# Altium schematic symbol library Centralize.SchLib: 1081 symbols (part 19 of 26)
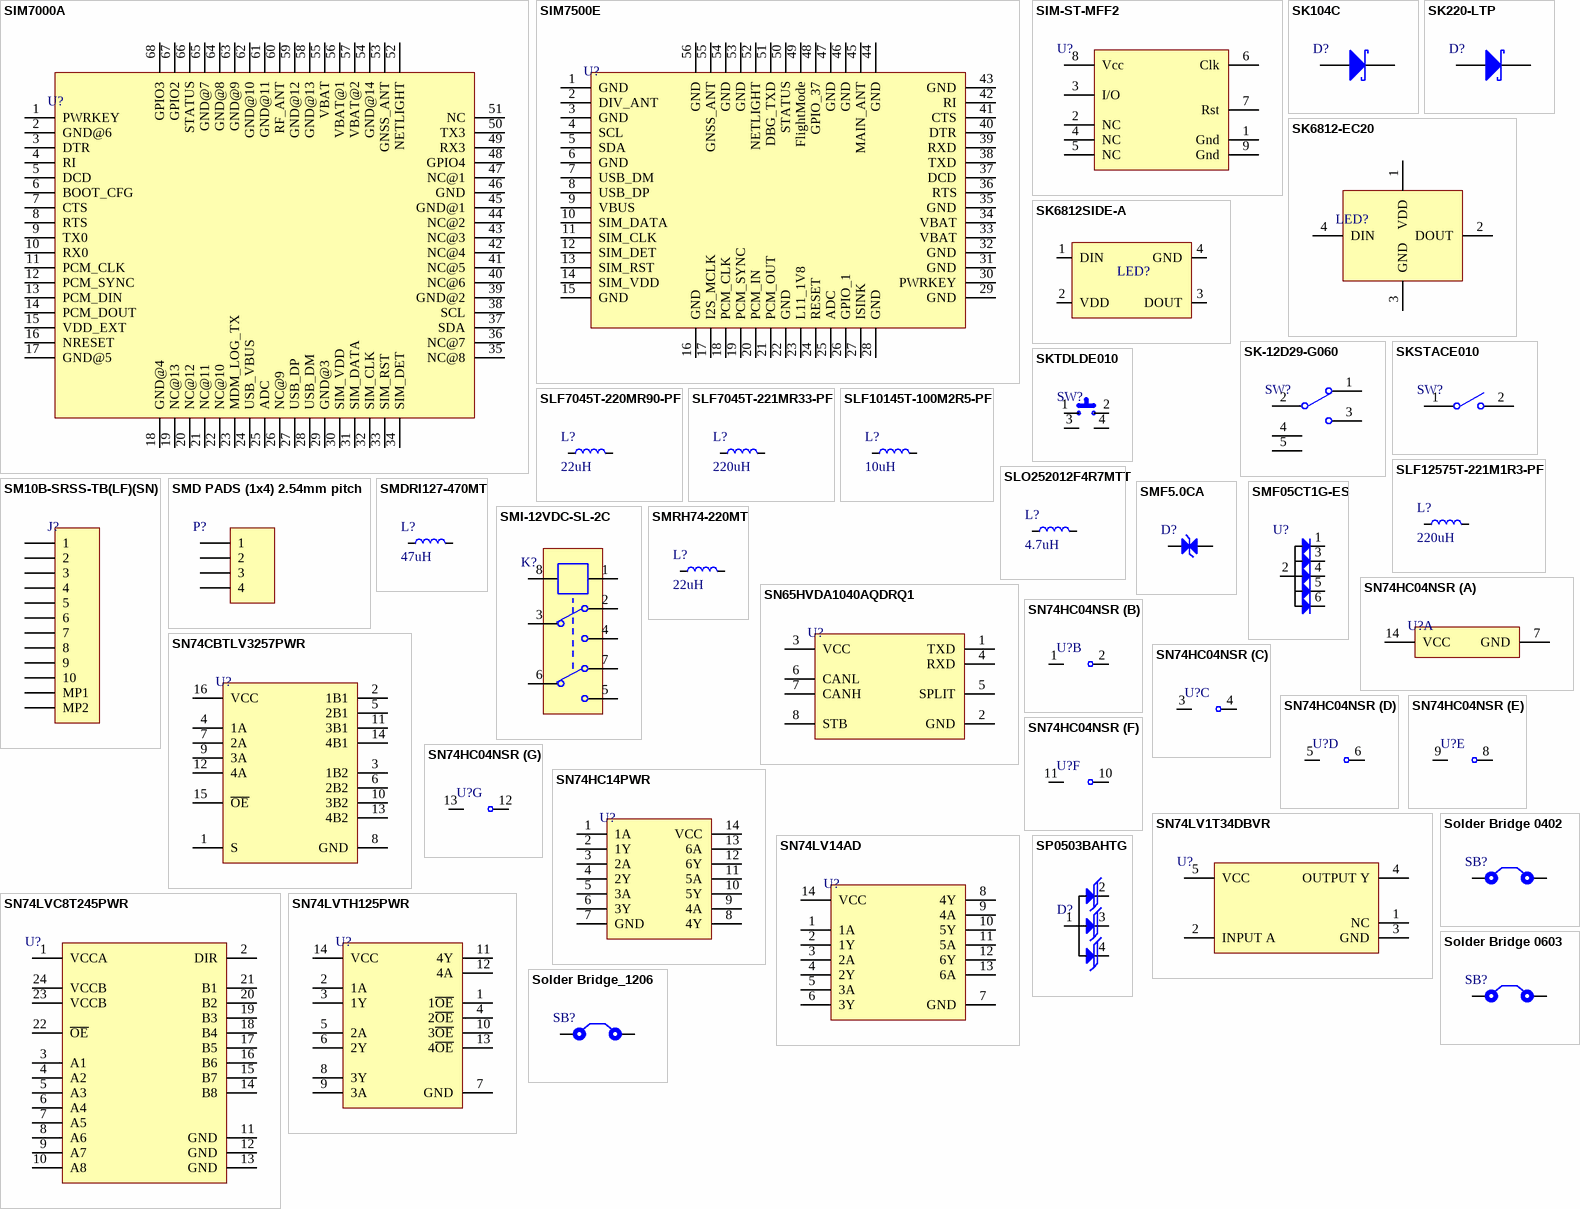
[diagram p65: symbols SIM7000A to SP0503BAHTG]

## SN74CBTLV3257PWR
designator U?
IC MUX/DEMUX 4 X 1:2 16TSSOP; Manufacturer: Texas Instruments; Manufacturer Part Number: SN74CBTLV3257PWR; Propagation Delay: 0.25ns; Number of Bits: 8; Polarity: Non-Inverting; Throw Configuration: SPDT; Number of Channels: 4; Min Supply Voltage: 2.3V; Max Supply Voltage: 3.6V; Bandwidth: 200MHz; Logic Function: Multiplexer,Demultiplexer; Number of Elements: 1; High Level Output Current: -128mA; Low Level Output Current: 128mA; Turn-On Delay Time: 6.1ns; Quiescent Current: 10uA; Supply Type: Single; Supplier 1: Mouser; RoHS: Yes; Category: Decoders and Multiplexers; Stock 1: 66357; Pricing 1: 1=0.72, 10=0.63, 50=0.63, 100=0.483, 1000=0.306, 10000=0.251 (USD); Mounting Technology: Surface Mount; Case/Package: TSSOP; Pins: 16; Weight: 0.002081oz; Min Operating Temperature: -40°C; Max Operating Temperature: 85°C; Packaging: Tape and Reel; Package Quantity: 2000; Number of Inputs: 8; Number of Outputs: 4; Independent Circuits: 4; Series: 74CBTLV; Technology: CMOS; Operating Supply Current: 10uA; Number of Switches: 1; Length: 5mm; Width: 4.4mm; Height: 1.15mm; Radiation Hardening: No; Lead Free: Lead Free; Reach SVHC Compliant: No; RoHS Compliant: Yes; ComponentLink1URL: https://datasheet.ciiva.com/34301/914507-34301751.pdf?src-supplier=Jameco; ComponentLink1Description: https://datasheet.ciiva.com/34301/914507-34301751.pdf?src-supplier=Jameco; ComponentLink2URL: https://datasheet.ciiva.com/15096/getdatasheetpartid-475832-15096886.pdf?src-supplier=Verical; ComponentLink2Description: https://datasheet.ciiva.com/15096/getdatasheetpartid-475832-15096886.pdf?src-supplier=Verical; ComponentLink3URL: https://datasheet.ciiva.com/41457/001016561-da-01-en-ic-4b-1of-sn74cbtlv3257pwr-tssop-16-tid-41457145.pdf?src-supplier=Conrad; ComponentLink3Description: https://datasheet.ciiva.com/41457/001016561-da-01-en-ic-4b-1of-sn74cbtlv3257pwr-tssop-16-tid-41457145.pdf?src-supplier=Conrad; ComponentLink4URL: https://datasheet.ciiva.com/1509/1634002-1509116.pdf?src-supplier=Element14; ComponentLink4Description: https://datasheet.ciiva.com/1509/1634002-1509116.pdf?src-supplier=Element14; ComponentLink5URL: https://datasheet.ciiva.com/46395/1882419-46395595.pdf?src-supplier=Element14; ComponentLink5Description: https://datasheet.ciiva.com/46395/1882419-46395595.pdf?src-supplier=Element14; ComponentLink6URL: https://datasheet.ciiva.com/1888/sn74cbtlv3257-1888772.pdf?src-supplier=Digi-Key; ComponentLink6Description: https://datasheet.ciiva.com/1888/sn74cbtlv3257-1888772.pdf?src-supplier=Digi-Key; ComponentLink7URL: https://datasheet.ciiva.com/1888/sn74cbtlv3257-1888771.pdf?src-supplier=Digi-Key; ComponentLink7Description: https://datasheet.ciiva.com/1888/sn74cbtlv3257-1888771.pdf?src-supplier=Digi-Key; ComponentLink8URL: https://datasheet.ciiva.com/1888/sn74cbtlv3257-1888773.pdf?src-supplier=Digi-Key; ComponentLink8Description: https://datasheet.ciiva.com/1888/sn74cbtlv3257-1888773.pdf?src-supplier=Digi-Key; ComponentLink9URL: https://datasheet.ciiva.com/3169/sn74cbtlv3257-3169116.pdf?src-supplier=Avnet; ComponentLink9Description: https://datasheet.ciiva.com/3169/sn74cbtlv3257-3169116.pdf?src-supplier=Avnet; ComponentLink10URL: https://datasheet.ciiva.com/3169/sn74cbtlv3257-3169117.pdf?src-supplier=Avnet; ComponentLink10Description: https://datasheet.ciiva.com/3169/sn74cbtlv3257-3169117.pdf?src-supplier=Avnet; Supplier Part Number 1: 595-SN74CBTLV3257PWR; LCSC Part Number: C7637; Item Type: IC
footprint 16-TSSOP (0.173", 4.40mm Width)
pins: 1 S, 2 1B1, 3 1B2, 4 1A, 5 2B1, 6 2B2, 7 2A, 8 GND, 9 3A, 10 3B2, 11 3B1, 12 4A, 13 4B2, 14 4B1, 15 ~{OE}, 16 VCC

## SN74HC04NSR
designator U?
6 16ns@6V,50pF 2uA 2V~6V SOIC-14-208mil Inverters ROHS; Manufacturer: Texas Instruments; Manufacturer Part Number: SN74HC04NSR; Max Supply Voltage: 6V; Min Supply Voltage: 2V; Number of Inputs: 1; Propagation Delay: 120ns; Logic Function: Buffer,Inverter; Number of Elements: 6; High Level Output Current: -5.2mA; Low Level Output Current: 5.2mA; Turn-On Delay Time: 20ns; Operating Supply Voltage: 5V; Item Type: IC; Supplier 1: Digi-Key; RoHS: Yes; Category: Logic Gates; Stock 1: 1936; Pricing 1: 1=0.74, 10=0.65, 25=0.6108, 100=0.4984, 250=0.46296, 500=0.394, 1000=0.3152 (USD); Mounting Technology: Surface Mount; Case/Package: SOP; Pins: 14; Weight: 0.007348oz; Min Operating Temperature: -40°C; Max Operating Temperature: 85°C; Packaging: Tape and Reel; Package Quantity: 1; Number of Circuits: 6; Quiescent Current: 2uA; Number of Gates: 6; Number of Bits: 6; Series: 74HC; Technology: CMOS; Radiation Hardening: No; Lead Free: Lead Free; RoHS Compliant: Yes; Reach SVHC Compliant: No; ComponentLink1URL: https://datasheet.ciiva.com/15089/getdatasheetpartid-409522-15089683.pdf?src-supplier=Verical; ComponentLink1Description: https://datasheet.ciiva.com/15089/getdatasheetpartid-409522-15089683.pdf?src-supplier=Verical; ComponentLink2URL: https://datasheet.ciiva.com/46439/1834038-46439813.pdf?src-supplier=Element14; ComponentLink2Description: https://datasheet.ciiva.com/46439/1834038-46439813.pdf?src-supplier=Element14; ComponentLink3URL: https://datasheet.ciiva.com/1864/sn74hc04-1864851.pdf?src-supplier=Digi-Key; ComponentLink3Description: https://datasheet.ciiva.com/1864/sn74hc04-1864851.pdf?src-supplier=Digi-Key; ComponentLink4URL: https://datasheet.ciiva.com/1864/sn74hc04-1864850.pdf?src-supplier=Digi-Key; ComponentLink4Description: https://datasheet.ciiva.com/1864/sn74hc04-1864850.pdf?src-supplier=Digi-Key; ComponentLink5URL: https://datasheet.ciiva.com/1864/sn74hc04-1864852.pdf?src-supplier=Digi-Key; ComponentLink5Description: https://datasheet.ciiva.com/1864/sn74hc04-1864852.pdf?src-supplier=Digi-Key; ComponentLink6URL: https://datasheet.ciiva.com/14292/sn54hc04-sp-14292233.pdf?src-supplier=Avnet; ComponentLink6Description: https://datasheet.ciiva.com/14292/sn54hc04-sp-14292233.pdf?src-supplier=Avnet; ComponentLink7URL: https://datasheet.ciiva.com/14288/sn54hc04-sp-14288839.pdf?src-supplier=Avnet; ComponentLink7Description: https://datasheet.ciiva.com/14288/sn54hc04-sp-14288839.pdf?src-supplier=Avnet; Supplier Part Number 1: 296-12883-1-ND; LCSC Part Number: C6812
footprint 14-SOIC (208 mil)
part A pins: 7 GND, 14 VCC
part B pins: 1 1A, 2 1Y
part C pins: 3 2A, 4 2Y
part D pins: 5 3A, 6 3Y
part E pins: 8 4Y, 9 4A
part F pins: 10 5Y, 11 5A
part G pins: 12 6Y, 13 6A

## SN74HC14PWR
designator U?
Inverter IC 6 Channel Schmitt Trigger 14-TSSOP; Manufacturer: Texas Instruments; Manufacturer Part Number: SN74HC14PWR; Propagation Delay: 155ns; Operating Supply Voltage: 5V; Max Supply Voltage: 6V; Min Supply Voltage: 2V; Number of Inputs: 6; Logic Function: Inverter,Schmitt Trigger; High Level Output Current: -5.2mA; Low Level Output Current: 5.2mA; Quiescent Current: 2uA; Turn-On Delay Time: 31ns; Supplier 1: Mouser; RoHS: Yes; Category: Logic Gates; Stock 1: 47880; Pricing 1: 1=0.37, 10=0.299, 50=0.299, 100=0.204, 1000=0.115, 10000=0.092 (USD); Mounting Technology: Surface Mount; Case/Package: TSSOP; Pins: 14; Weight: 0.002018oz; Min Operating Temperature: -40°C; Max Operating Temperature: 85°C; Packaging: Tape and Reel; Number of Circuits: 6; Number of Bits: 6; Series: 74HC; Output Current: 5.2mA; Number of Elements: 6; Number of Gates: 6; Input Type: SCHMITT TRIGGER; Technology: CMOS; Radiation Hardening: No; Lead Free: Lead Free; RoHS Compliant: Yes; Reach SVHC Compliant: No; ComponentLink1URL: https://datasheet.ciiva.com/27050/915016-27050919.pdf?src-supplier=Jameco; ComponentLink1Description: https://datasheet.ciiva.com/27050/915016-27050919.pdf?src-supplier=Jameco; ComponentLink2URL: https://datasheet.ciiva.com/15089/getdatasheetpartid-253158-15089479.pdf?src-supplier=Verical; ComponentLink2Description: https://datasheet.ciiva.com/15089/getdatasheetpartid-253158-15089479.pdf?src-supplier=Verical; ComponentLink3URL: https://datasheet.ciiva.com/46439/1836414-46439775.pdf?src-supplier=Element14; ComponentLink3Description: https://datasheet.ciiva.com/46439/1836414-46439775.pdf?src-supplier=Element14; ComponentLink4URL: https://datasheet.ciiva.com/1864/sn74hc14-1864726.pdf?src-supplier=Digi-Key; ComponentLink4Description: https://datasheet.ciiva.com/1864/sn74hc14-1864726.pdf?src-supplier=Digi-Key; ComponentLink5URL: https://datasheet.ciiva.com/1864/sn74hc14-1864725.pdf?src-supplier=Digi-Key; ComponentLink5Description: https://datasheet.ciiva.com/1864/sn74hc14-1864725.pdf?src-supplier=Digi-Key; ComponentLink6URL: https://datasheet.ciiva.com/1864/sn74hc14-1864727.pdf?src-supplier=Digi-Key; ComponentLink6Description: https://datasheet.ciiva.com/1864/sn74hc14-1864727.pdf?src-supplier=Digi-Key; ComponentLink7URL: https://datasheet.ciiva.com/14290/sn54hc14-14290382.pdf?src-supplier=Avnet; ComponentLink7Description: https://datasheet.ciiva.com/14290/sn54hc14-14290382.pdf?src-supplier=Avnet; ComponentLink8URL: https://datasheet.ciiva.com/14290/sn54hc14-14290379.pdf?src-supplier=Avnet; ComponentLink8Description: https://datasheet.ciiva.com/14290/sn54hc14-14290379.pdf?src-supplier=Avnet; Supplier Part Number 1: 595-SN74HC14PWR; LCSC Part Number: C6821; Item Type: IC
footprint 14-TSSOP
pins: 1 1A, 2 1Y, 3 2A, 4 2Y, 5 3A, 6 3Y, 7 GND, 8 4Y, 9 4A, 10 5Y, 11 5A, 12 6Y, 13 6A, 14 VCC

## SN74LV1T34DBVR
designator U?
IC BUF NON-INVERT 5.5V SOT23-5; Manufacturer: Texas Instruments; Manufacturer Part Number: SN74LV1T34DBVR; Number of Elements: 1; Logic Function: Buffer,Inverting; High Level Output Current: -8mA; Low Level Output Current: 8mA; Min Supply Voltage: 1.6V; Polarity: Non-Inverting; Propagation Delay: 15.5ns; Quiescent Current: 1uA; Supplier 1: Digi-Key; Stock 1: 37360; Pricing 1: 1=0.43, 10=0.349, 25=0.3192, 100=0.2374, 250=0.2152, 500=0.17808, 1000=0.13356 (USD); Mount: Surface Mount; Case/Package: SOT-23-5; Number of Pins: 5; Weight: 0.000353oz; Min Operating Temperature: -40°C; Max Operating Temperature: 125°C; Packaging: Tape and Reel; Number of Bits per Element: 1; Number of Bits: 1; Package Quantity: 3000; Max Supply Voltage: 5.5V; Number of Input Lines: 1; Number of Output Lines: 1; Operating Supply Current: 8mA; Number of Channels: 1; Number of Inputs: 1; Number of Outputs: 1; Radiation Hardening: No; RoHS Compliant: Yes; REACH SVHC: No SVHC; Lead Free: Lead Free; ComponentLink1URL: http://www.ti.com/lit/pdf/sdyu001?src-supplier=Digi-Key; ComponentLink1Description: http://www.ti.com/lit/pdf/sdyu001?src-supplier=Digi-Key; ComponentLink2URL: http://www.ti.com/lit/ds/symlink/sn74lv1t34.pdf?src-supplier=Avnet; ComponentLink2Description: http://www.ti.com/lit/ds/symlink/sn74lv1t34.pdf?src-supplier=Avnet; Supplier Part Number 1: 296-37176-6-ND; LCSC Part Number: C100024; Item Type: IC
footprint SOT-23-5
pins: 1 NC, 2 INPUT A, 3 GND, 4 OUTPUT Y, 5 VCC

## SN74LV14AD
designator U?
SOIC-14 Inverters ROHS; Manufacturer: Texas Instruments; Manufacturer Part Number: SN74LV14AD; Logic Function: Buffer,Inverter,Schmitt Trigger; Number of Elements: 6; Output Current: 12mA; Number of Inputs: 1; Min Supply Voltage: 2V; Max Supply Voltage: 5.5V; Propagation Delay: 27ns; Quiescent Current: 20uA; High Level Output Current: -12mA; Turn-On Delay Time: 12ns; Input Type: SCHMITT TRIGGER; Schmitt Trigger Input: Yes; Item Type: IC; Supplier 1: Digi-Key; RoHS: Yes; Category: Logic Gates; Stock 1: 2467; Pricing 1: 1=1.16000, 10=1.04100, 25=0.98840, 100=0.81190, 250=0.75892, 500=0.67066, 1000=0.52947, 2500=0.49950 (USD); Mount: Surface Mount; Case/Package: SOIC; Number of Pins: 14; Weight: 0.004318oz; Min Operating Temperature: -40°C; Max Operating Temperature: 125°C; Package Quantity: 50; Packaging: Rail/Tube; Number of Circuits: 6; Low Level Output Current: 12mA; Series: 74LV; Technology: CMOS; Number of Bits: 6; Number of Gates: 6; Length: 8.65mm; Width: 3.91mm; Height: 1.58mm; Radiation Hardening: No; Lead Free: Lead Free; RoHS Compliant: Yes; Reach SVHC Compliant: Yes; ComponentLink1URL: https://datasheet.ciiva.com/27050/917231-27050962.pdf?src-supplier=Jameco; ComponentLink1Description: https://datasheet.ciiva.com/27050/917231-27050962.pdf?src-supplier=Jameco; ComponentLink2URL: https://datasheet.ciiva.com/7948/1633820-7948979.pdf?src-supplier=Element14; ComponentLink2Description: https://datasheet.ciiva.com/7948/1633820-7948979.pdf?src-supplier=Element14; ComponentLink3URL: https://datasheet.ciiva.com/15089/getdatasheetpartid-253475-15089486.pdf?src-supplier=Verical; ComponentLink3Description: https://datasheet.ciiva.com/15089/getdatasheetpartid-253475-15089486.pdf?src-supplier=Verical; ComponentLink4URL: https://datasheet.ciiva.com/1866/sn74lv14a-1866324.pdf?src-supplier=Digi-Key; ComponentLink4Description: https://datasheet.ciiva.com/1866/sn74lv14a-1866324.pdf?src-supplier=Digi-Key; ComponentLink5URL: https://datasheet.ciiva.com/14290/sn74lv14a-14290269.pdf?src-supplier=Avnet; ComponentLink5Description: https://datasheet.ciiva.com/14290/sn74lv14a-14290269.pdf?src-supplier=Avnet; Supplier Part Number 1: 296-1678-5-ND; LCSC Part Number: C2860778
footprint 14-SOIC
pins: 1 1A, 2 1Y, 3 2A, 4 2Y, 5 3A, 6 3Y, 7 GND, 8 4Y, 9 4A, 10 5Y, 11 5A, 12 6Y, 13 6A, 14 VCC

## SN74LVC8T245PWR
designator U?
IC TRANSLATION TXRX 5.5V 24TSSOP; Manufacturer: Texas Instruments; Manufacturer Part Number: SN74LVC8T245PWR; Logic Function: Translator,Transceiver; Propagation Delay: 4.2ns; Direction: Bidirectional; Min Supply Voltage: 1.65V; Number of Bits: 8; High Level Output Current: -32mA; Low Level Output Current: 32mA; Quiescent Current: 15uA; Number of Elements: 1; Data Rate: 500Mbps; Turn-On Delay Time: 32.2ns; Polarity: Non-Inverting; Operating Supply Voltage: 3.3V; ComponentLink1URL: https://datasheet.ciiva.com/1899/sn74lvc8t245-ep-1899655.pdf?src-supplier=Digi-Key; ComponentLink1Description: https://datasheet.ciiva.com/1899/sn74lvc8t245-ep-1899655.pdf?src-supplier=Digi-Key; ComponentLink2URL: https://datasheet.ciiva.com/1628/1636538-1628674.pdf?src-supplier=Newark; ComponentLink2Description: https://datasheet.ciiva.com/1628/1636538-1628674.pdf?src-supplier=Newark; ComponentLink3URL: https://datasheet.ciiva.com/15086/getdatasheetpartid-299102-15086582.pdf?src-supplier=Verical; ComponentLink3Description: https://datasheet.ciiva.com/15086/getdatasheetpartid-299102-15086582.pdf?src-supplier=Verical; ComponentLink4URL: https://datasheet.ciiva.com/26868/sn74lvc8t245mpwrep-26868235.pdf?src-supplier=IIIC; ComponentLink4Description: https://datasheet.ciiva.com/26868/sn74lvc8t245mpwrep-26868235.pdf?src-supplier=IIIC; ComponentLink5URL: https://datasheet.ciiva.com/1899/sn74lvc8t245-ep-1899656.pdf?src-supplier=Digi-Key; ComponentLink5Description: https://datasheet.ciiva.com/1899/sn74lvc8t245-ep-1899656.pdf?src-supplier=Digi-Key; ComponentLink6URL: https://datasheet.ciiva.com/1899/sn74lvc8t245-ep-1899657.pdf?src-supplier=Digi-Key; ComponentLink6Description: https://datasheet.ciiva.com/1899/sn74lvc8t245-ep-1899657.pdf?src-supplier=Digi-Key; ComponentLink7URL: https://datasheet.ciiva.com/25972/sn74lvc8t245-ep-25972059.pdf?src-supplier=Avnet+Europe; ComponentLink7Description: https://datasheet.ciiva.com/25972/sn74lvc8t245-ep-25972059.pdf?src-supplier=Avnet+Europe; Supplier 1: Digi-Key; RoHS: Yes; Category: Buffers, Drivers and Transceivers; Pricing 1: 1=1.26000, 10=1.12600, 25=1.06840, 100=0.87770, 250=0.82044, 500=0.66780, 1000=0.63000 (USD); Mount: Surface Mount; Case/Package: TSSOP; Number of Pins: 24; Weight: 0.003157oz; Contact Plating: Gold; Min Operating Temperature: -40°C; Max Operating Temperature: 85°C; Package Quantity: 1; Packaging: Tape and Reel; Max Supply Voltage: 5.5V; Number of Outputs: 8; Number of Channels: 8; Length: 7.9mm; Width: 4.5mm; Height: 1.05mm; Radiation Hardening: No; Lead Free: Lead Free; REACH SVHC: No SVHC; ComponentLink8URL: https://datasheet.ciiva.com/34301/1048559-34301923.pdf?src-supplier=Jameco; ComponentLink8Description: https://datasheet.ciiva.com/34301/1048559-34301923.pdf?src-supplier=Jameco; ComponentLink9URL: https://datasheet.ciiva.com/15086/getdatasheetpartid-48801-15086005.pdf?src-supplier=Verical; ComponentLink9Description: https://datasheet.ciiva.com/15086/getdatasheetpartid-48801-15086005.pdf?src-supplier=Verical; ComponentLink10URL: https://datasheet.ciiva.com/41455/001017232-da-01-en-ic-bus-8bit-sn74lvc8t245pwr-tssop-24-tid-41455868.pdf?src-supplier=Conrad; ComponentLink10Description: https://datasheet.ciiva.com/41455/001017232-da-01-en-ic-bus-8bit-sn74lvc8t245pwr-tssop-24-tid-41455868.pdf?src-supplier=Conrad; ComponentLink11URL: https://datasheet.ciiva.com/26867/sn74lvc8t245pwr-26867745.pdf?src-supplier=IIIC; ComponentLink11Description: https://datasheet.ciiva.com/26867/sn74lvc8t245pwr-26867745.pdf?src-supplier=IIIC; ComponentLink12URL: https://datasheet.ciiva.com/7795/1763937-7795013.pdf?src-supplier=Element14; ComponentLink12Description: https://datasheet.ciiva.com/7795/1763937-7795013.pdf?src-supplier=Element14; ComponentLink13URL: https://datasheet.ciiva.com/46439/1831204-46439647.pdf?src-supplier=Element14; ComponentLink13Description: https://datasheet.ciiva.com/46439/1831204-46439647.pdf?src-supplier=Element14; ComponentLink14URL: https://datasheet.ciiva.com/1899/sn74lvc8t245-1899396.pdf?src-supplier=Digi-Key; ComponentLink14Description: https://datasheet.ciiva.com/1899/sn74lvc8t245-1899396.pdf?src-supplier=Digi-Key; ComponentLink15URL: https://datasheet.ciiva.com/1899/sn74lvc8t245-1899395.pdf?src-supplier=Digi-Key; ComponentLink15Description: https://datasheet.ciiva.com/1899/sn74lvc8t245-1899395.pdf?src-supplier=Digi-Key; ComponentLink16URL: https://datasheet.ciiva.com/1899/sn74lvc8t245-1899397.pdf?src-supplier=Digi-Key; ComponentLink16Description: https://datasheet.ciiva.com/1899/sn74lvc8t245-1899397.pdf?src-supplier=Digi-Key; ComponentLink17URL: https://datasheet.ciiva.com/25973/sn74lvc8t245-25973803.pdf?src-supplier=Avnet+Europe; ComponentLink17Description: https://datasheet.ciiva.com/25973/sn74lvc8t245-25973803.pdf?src-supplier=Avnet+Europe; Supplier Part Number 1: 296-18593-1-ND; LCSC Part Number: C27643; Item Type: IC
footprint 24-TSSOP_
pins: 1 VCCA, 2 DIR, 3 A1, 4 A2, 5 A3, 6 A4, 7 A5, 8 A6, 9 A7, 10 A8, 11 GND, 12 GND, 13 GND, 14 B8, 15 B7, 16 B6, 17 B5, 18 B4, 19 B3, 20 B2, 21 B1, 22 ~{OE}, 23 VCCB, 24 VCCB

## SN74LVTH125PWR
designator U?
IC BUS BUFFER TRI-ST QD 14TSSOP; Manufacturer: Texas Instruments; Manufacturer Part Number: SN74LVTH125PWR; Logic Function: Buffer,Inverting; Polarity: Non-Inverting; Propagation Delay: 2.1ns; Min Supply Voltage: 2.7V; Max Supply Voltage: 3.6V; Number of Channels: 4; Operating Supply Voltage: 3.3V; Number of Bits per Element: 1; High Level Output Current: -32mA; Low Level Output Current: 64mA; Quiescent Current: 7mA; Number of Output Lines: 3; Supplier 1: Digi-Key; RoHS: Yes; Category: Logic Gates; Stock 1: 980; Pricing 1: 1=0.64000, 10=0.56000, 25=0.52560, 100=0.42910, 250=0.39856, 500=0.33920, 1000=0.28000 (USD); Mount: Surface Mount; Case/Package: TSSOP; Number of Pins: 14; Contact Plating: Gold; Min Operating Temperature: -40°C; Max Operating Temperature: 85°C; Packaging: Tape and Reel; Number of Outputs: 4; Package Quantity: 2000; Number of Elements: 4; Turn-On Delay Time: 2.1ns; Number of Bits: 4; Number of Inputs: 4; Number of Input Lines: 4; Number of Gates: 4; Output Current: 64mA; Length: 5mm; Width: 4.4mm; Height: 1.15mm; Radiation Hardening: No; Lead Free: Lead Free; RoHS Compliant: Yes; REACH SVHC: No SVHC; ComponentLink1URL: https://datasheet.ciiva.com/41455/001017258-da-01-en-ic-bus-buf-q-sn74lvth125pwr-tssop-14-tid-41455824.pdf?src-supplier=Conrad; ComponentLink1Description: https://datasheet.ciiva.com/41455/001017258-da-01-en-ic-bus-buf-q-sn74lvth125pwr-tssop-14-tid-41455824.pdf?src-supplier=Conrad; ComponentLink2URL: https://datasheet.ciiva.com/46442/1764295-46442090.pdf?src-supplier=Element14; ComponentLink2Description: https://datasheet.ciiva.com/46442/1764295-46442090.pdf?src-supplier=Element14; ComponentLink3URL: https://datasheet.ciiva.com/1834/sn74lvth125-1834408.pdf?src-supplier=Digi-Key; ComponentLink3Description: https://datasheet.ciiva.com/1834/sn74lvth125-1834408.pdf?src-supplier=Digi-Key; ComponentLink4URL: https://datasheet.ciiva.com/1834/sn74lvth125-1834407.pdf?src-supplier=Digi-Key; ComponentLink4Description: https://datasheet.ciiva.com/1834/sn74lvth125-1834407.pdf?src-supplier=Digi-Key; ComponentLink5URL: https://datasheet.ciiva.com/7795/sn74lvth125-7795066.pdf?src-supplier=Element14; ComponentLink5Description: https://datasheet.ciiva.com/7795/sn74lvth125-7795066.pdf?src-supplier=Element14; ComponentLink6URL: https://datasheet.ciiva.com/14301/scbs703i-14301146.pdf?src-supplier=Avnet; ComponentLink6Description: https://datasheet.ciiva.com/14301/scbs703i-14301146.pdf?src-supplier=Avnet; ComponentLink7URL: https://datasheet.ciiva.com/26263/sn74lvth125-26263836.pdf?src-supplier=Avnet+Europe; ComponentLink7Description: https://datasheet.ciiva.com/26263/sn74lvth125-26263836.pdf?src-supplier=Avnet+Europe; Supplier Part Number 1: 296-8660-1-ND; LCSC Part Number: C7042; Item Type: IC
footprint 14-TSSOP
pins: 1 1~{OE}, 2 1A, 3 1Y, 4 2~{OE}, 5 2A, 6 2Y, 7 GND, 8 3Y, 9 3A, 10 3~{OE}, 11 4Y, 12 4A, 13 4~{OE}, 14 VCC

## Solder Bridge 0402
designator SB?
Solder Bridge ON; Manufacturer Part Number: Solder Bridge 0402; Item Type: Solder Bridge
footprint Solder Bridge 0402
pins: 1, 2

## Solder Bridge 0603
designator SB?
Solder Bridge ON; Manufacturer Part Number: Solder Bridge; Item Type: Solder Bridge
footprint Solder Bridge (Solder Bridge ON)
pins: 1, 2

## Solder Bridge_1206
designator SB?
Solder Bridge ON; Manufacturer Part Number: Solder Bridge_1206; Item Type: Solder Bridge
footprint SOLDER BRIDGE-1206_
pins: 1, 2

## SP0503BAHTG
designator D?
ESD Suppressor TVS 5.5V 4-Pin(3+Tab) SOT-143 T/R; Manufacturer: Littelfuse; Manufacturer Part Number: SP0503BAHTG; Element Configuration: Common Anode; Direction: Unidirectional; Capacitance: 30pF; Number of Channels: 3; Clamping Voltage: 7.8V; Power Line Protection: No; Polarity: Bidirectional,Unidirectional; Max Power Dissipation: 225mW; ESD Protection: Yes; Max Reverse Leakage Current: 100nA; Voltage Rating (DC): 5V; Diode Type: Avalanche; Clamping Voltage-Max: 8V; Item Type: Diode; Supplier 1: Digi-Key; RoHS: Yes; Category: Diodes; Stock 1: 651; Pricing 1: 1=0.92000, 10=0.81200, 100=0.62260, 500=0.49214, 1000=0.39371 (USD); Mount: Surface Mount; Case/Package: SOT-143; Number of Pins: 4; Min Operating Temperature: -40°C; Max Operating Temperature: 85°C; Operating Supply Voltage: 5.5V; Packaging: Tape and Reel; Number of Unidirectional Channels: 3; Reverse Standoff Voltage: 5.5V; Breakdown Voltage: 5.5V; Termination: SMD/SMT; Working Voltage: 5.5V; Peak Pulse Power: 225mW; Leakage Current: 100nA; Number of Elements: 3; Power Dissipation: 225mW; Resistor Type: Zener; Series: SP05, SPA®; Length: 3.04mm; Width: 1.4mm; Height: 1.05mm; Depth: 1.4mm; Radiation Hardening: No; REACH SVHC: No SVHC; Lead Free: Lead Free; RoHS Compliant: Yes; ComponentLink1URL: https://datasheet.ciiva.com/15143/getdatasheetpartid-116020-15143550.pdf?src-supplier=Verical; ComponentLink1Description: https://datasheet.ciiva.com/15143/getdatasheetpartid-116020-15143550.pdf?src-supplier=Verical; ComponentLink2URL: https://datasheet.ciiva.com/332/sp05xxba-332550.pdf?src-supplier=Digi-Key; ComponentLink2Description: https://datasheet.ciiva.com/332/sp05xxba-332550.pdf?src-supplier=Digi-Key; ComponentLink3URL: https://datasheet.ciiva.com/8062/littefuse-spa-sp050x-8062422.pdf?src-supplier=Element14; ComponentLink3Description: https://datasheet.ciiva.com/8062/littefuse-spa-sp050x-8062422.pdf?src-supplier=Element14; ComponentLink4URL: https://datasheet.ciiva.com/22697/1911798-22697942.pdf?src-supplier=Element14; ComponentLink4Description: https://datasheet.ciiva.com/22697/1911798-22697942.pdf?src-supplier=Element14; ComponentLink5URL: https://datasheet.ciiva.com/332/sp05xxba-332551.pdf?src-supplier=Digi-Key; ComponentLink5Description: https://datasheet.ciiva.com/332/sp05xxba-332551.pdf?src-supplier=Digi-Key; ComponentLink6URL: https://datasheet.ciiva.com/16449/sp05xxba-16449463.pdf?src-supplier=Future+Electronics; ComponentLink6Description: https://datasheet.ciiva.com/16449/sp05xxba-16449463.pdf?src-supplier=Future+Electronics; ComponentLink7URL: https://datasheet.ciiva.com/332/sp05xxba-332552.pdf?src-supplier=Digi-Key; ComponentLink7Description: https://datasheet.ciiva.com/332/sp05xxba-332552.pdf?src-supplier=Digi-Key; ComponentLink8URL: https://datasheet.ciiva.com/4509/sp05x-leadfree-4509162.pdf?src-supplier=Mouser; ComponentLink8Description: https://datasheet.ciiva.com/4509/sp05x-leadfree-4509162.pdf?src-supplier=Mouser; ComponentLink9URL: https://datasheet.ciiva.com/7650/526672-7650894.pdf?src-supplier=Element14; ComponentLink9Description: https://datasheet.ciiva.com/7650/526672-7650894.pdf?src-supplier=Element14; Supplier Part Number 1: F2715CT-ND; LCSC Part Number: C3029025
footprint SOT-143-4_
pins: 1 A, 2 K, 3 K, 4 K

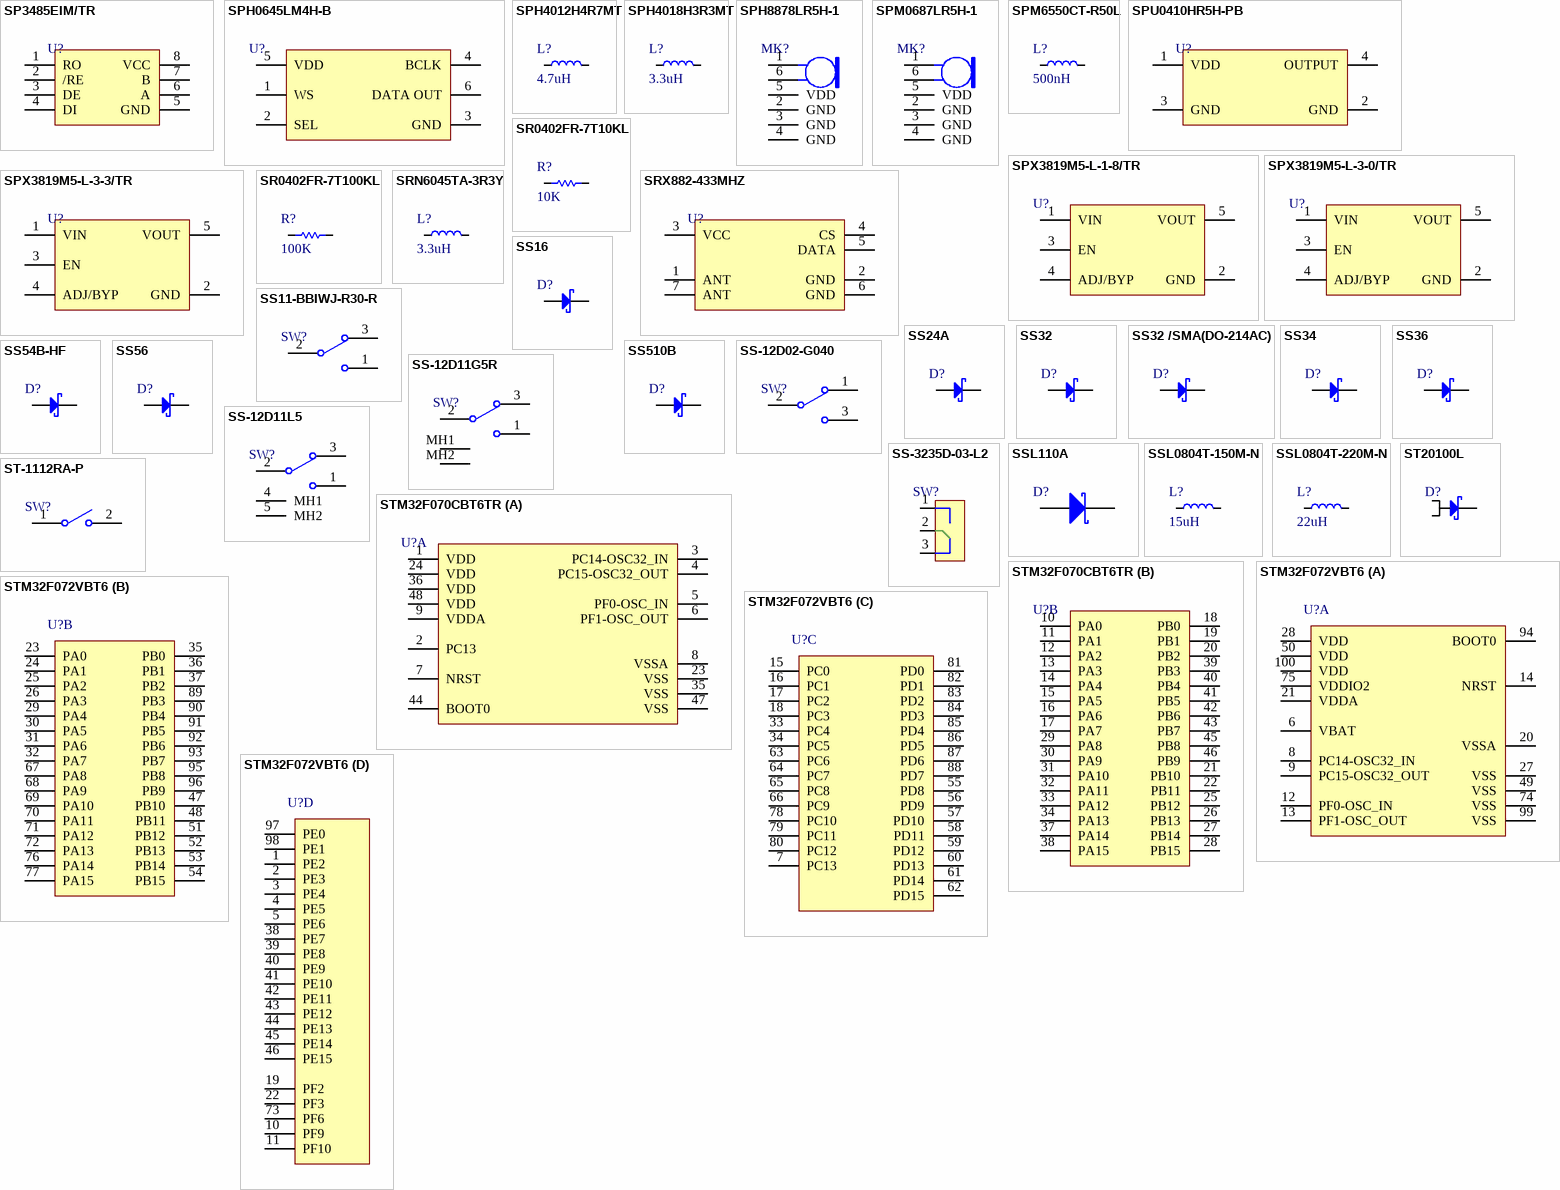
[diagram p38: symbols SP3485EIM/TR to STM32F072VBT6]

## SP3485EIM/TR
designator U?
SOP-8 RS-485/RS-422 ICs ROHS; Manufacturer: HGSEMI; Manufacturer Part Number: SP3485EIM/TR; Item Type: IC; Package: SOP-8; LCSC Part Number: C519086; ComponentLink1Description: LCSC; ComponentLink1URL: https://www.lcsc.com/product-detail/RS-485-RS-422-ICs_HGSEMI-SP3485EIM-TR_C519086.html
footprint SOP-8
pins: 1 RO, 2 /RE, 3 DE, 4 DI, 5 GND, 6 A, 7 B, 8 VCC

## SPH0645LM4H-B
designator U?
CRAWFORD MIC DGT I2S BOTTOM PORT; Manufacturer: Knowles; Manufacturer Part Number: SPH0645LM4H-B; Shape: Rectangular; Direction: Omnidirectional; Voltage Rating: 1.8V; Operating Supply Current: 600uA; Output Type: Digital; Supplier 1: Digi-Key; Stock 1: 20813; Pricing 1: 1=2.88, 10=2.384, 25=2.2008, 50=2.0678, 100=1.9398, 500=1.66194, 1000=1.64372 (USD); Packaging: Tape and Reel; Termination: Solder; Length: 3.5mm; Width: 2.65mm; Height: 1.08mm; RoHS Compliant: Yes; ComponentLink1URL: https://media.digikey.com/pdf/Data%20Sheets/Knowles%20Acoustics%20PDFs/SPH0645LM4H-B.pdf?src-supplier=Digi-Key; ComponentLink1Description: https://media.digikey.com/pdf/Data%20Sheets/Knowles%20Acoustics%20PDFs/SPH0645LM4H-B.pdf?src-supplier=Digi-Key; Supplier Part Number 1: 423-1405-1-ND
footprint SPH0645LM4H-B_ (MEMS Microphones DIG MEMs Mic, BP w/ I2S output)
pins: 1 WS, 2 SEL, 3 GND, 4 BCLK, 5 VDD, 6 DATA OUT

## SPH4012H4R7MT
designator L?, comment 4.7uH
1.2A 4.7uH ±20% 108mΩ SMD Power Inductors ROHS; Manufacturer: Sunlord; Manufacturer Part Number: SPH4012H4R7MT; Supplier 1: Digi-Key; RoHS: No; Pricing 1: 4500=0.21008 (USD); Supplier Part Number 1: 3442-SPH4012H4R7MTTR-ND; LCSC Part Number: C98396; Item Type: Inductor; ComponentLink1Description: LCSC; ComponentLink1URL: https://www.lcsc.com/product-detail/Power-Inductors_Sunlord-SPH4012H4R7MT_C98396.html
footprint SPH4012H4R7MT
pins: 1, 2

## SPH4018H3R3MT
designator L?, comment 3.3uH
Fixed Ind 3.3UH 2A 66 Mohm SMD; Manufacturer: Sunlord; Manufacturer Part Number: SPH4018H3R3MT; Supplier 1: Digi-Key; RoHS: No; Supplier Part Number 1: 3442-SPH4018H3R3MTTR-ND; LCSC Part Number: C98399
footprint SPH4018H3R3MT_
pins: 1, 2

## SPH8878LR5H-1
designator MK?
Lovato Analog Bottom Port Mic; Manufacturer: Knowles; Manufacturer Part Number: SPH8878LR5H-1; Item Type: Microphone; Supplier 1: Digi-Key; RoHS: No; Category: Microphones; Stock 1: 1676; Pricing 1: 1=1.45000, 10=1.20800, 25=1.11760, 50=1.05220, 100=0.98880, 500=0.85076, 1000=0.79529 (USD); Supplier Part Number 1: 423-SPH8878LR5H-1CT-ND; LCSC Part Number: *
footprint SPH8878LR5H-1
pins: 1 OUT+, 2 GND, 3 GND, 4 GND, 5 VDD, 6 OUT-

## SPM0687LR5H-1
designator MK?
WINFREY MIC HI SNR/AOP BOT PORT; Manufacturer: Knowles; Manufacturer Part Number: SPM0687LR5H-1; Shape: Rectangular; Output Type: Analog; Operating Supply Current: 285uA; Item Type: Microphone; Supplier 1: Digi-Key; RoHS: Yes; Category: Microphones; Stock 1: 116440; Pricing 1: 1=2.12000, 10=1.75900, 25=1.62560, 50=1.52880, 100=1.43540, 500=1.23212, 1000=1.17611 (USD); Packaging: Cut Tape; Termination: Solder; ComponentLink1URL: https://media.digikey.com/pdf/Data%20Sheets/Knowles%20Acoustics%20PDFs/SPM0687LR5H-1.pdf?src-supplier=Digi-Key; ComponentLink1Description: https://media.digikey.com/pdf/Data%20Sheets/Knowles%20Acoustics%20PDFs/SPM0687LR5H-1.pdf?src-supplier=Digi-Key; Supplier Part Number 1: 423-SPM0687LR5H-1CT-ND; LCSC Part Number: *
footprint SPM0687LR5H-1
pins: 1 OUT+, 2 GND, 3 GND, 4 GND, 5 VDD, 6 OUT-

## SPM6550CT-R50L
designator L?, comment 500nH
13.2A 500nH ±15% 3.9mΩ 20.4A - Power Inductors ROHS; Manufacturer: TDK; Manufacturer Part Number: SPM6550CT-R50L; Supplier 1: Arrow Electronics; RoHS: No; Category: Fixed Inductors; Stock 1: 629; Pricing 1: 1=0.46220, 10=0.45510, 25=0.44790, 50=0.44080, 100=0.43370, 250=0.42650, 500=0.41940 (USD); LCSC Part Number: C2045557; Item Type: Inductor; Supplier Part Number 1: SPM6550CT-R50L; ComponentLink1Description: LCSC; ComponentLink1URL: https://www.lcsc.com/product-detail/Power-Inductors_TDK-SPM6550CT-R50L_C2045557.html
footprint SPM6550CT-R50L
pins: 1, 2

## SPU0410HR5H-PB
designator U?
SPU-TOP MIC IOT FOCUSED MIC; Manufacturer: Knowles; Manufacturer Part Number: SPU0410HR5H-PB; Shape: Rectangular; Impedance: 300R; Voltage Rating: 3.6V; Direction: Omnidirectional; Operating Supply Current: 250uA; Signal to Noise Ratio (SNR): 59dB; Output Type: Analog; Supplier 1: Digi-Key; Stock 1: 83682; Pricing 1: 1=0.82, 10=0.688, 25=0.6376, 50=0.6006, 100=0.5649, 500=0.48696 (USD); Package Quantity: 1200; Packaging: Tape and Reel; Operating Supply Voltage: 3.6V; Termination: SMD/SMT; Length: 3.76mm; Height: 1.2mm; Width: 2.95mm; Depth: 1.2mm; ComponentLink1URL: https://media.digikey.com/pdf/Data%20Sheets/Knowles%20Acoustics%20PDFs/SiSonic_Design_Guide.pdf?src-supplier=Mouser; ComponentLink1Description: https://media.digikey.com/pdf/Data%20Sheets/Knowles%20Acoustics%20PDFs/SiSonic_Design_Guide.pdf?src-supplier=Mouser; ComponentLink2URL: https://media.digikey.com/pdf/Data%20Sheets/Knowles%20Acoustics%20PDFs/SiSonic_Design_Guide.pdf?src-supplier=Digi-Key; ComponentLink2Description: https://media.digikey.com/pdf/Data%20Sheets/Knowles%20Acoustics%20PDFs/SiSonic_Design_Guide.pdf?src-supplier=Digi-Key; Supplier Part Number 1: 423-1138-1-ND; LCSC Part Number: C73122
footprint SPU0410HR5H-PB
pins: 1 VDD, 2 GND, 3 GND, 4 OUTPUT

## SPX3819M5-L-1-8/TR
designator U?
LDO Voltage Regulators 500mA LOW NOISE LDO; Manufacturer: MaxLinear; Manufacturer Part Number: SPX3819M5-L-1-8/TR; Item Type: IC; Supplier 1: Mouser; RoHS: Yes; Stock 1: 19446; Pricing 1: 1=0.68000, 10=0.57700, 50=0.57700, 100=0.40000, 1000=0.26200, 10000=0.21000 (USD); RoHS Compliant: Yes; ComponentLink1URL: https://www.exar.com/content/document.ashx?id=22106&src-supplier=Digi-Key; ComponentLink1Description: https://www.exar.com/content/document.ashx?id=22106&src-supplier=Digi-Key; Supplier Part Number 1: 701-SPX3819M5-L-18TR
footprint SOT-23-5
pins: 1 VIN, 2 GND, 3 EN, 4 ADJ/BYP, 5 VOUT

## SPX3819M5-L-3-0/TR
designator U?
SPX3819 Series 3 V Fixed Output 500 mA SMT LDO Regulator - SOT-23-5; Manufacturer: MaxLinear; Manufacturer Part Number: SPX3819M5-L-3-0/TR; Max Input Voltage: 16V; Min Output Voltage: 3V; Dropout Voltage: 700mV; Output Current: 500mA; Quiescent Current: 8uA; Output Configuration: Positive; Number of Regulators: 1; Max Supply Current: 30mA; Supplier 1: Mouser; RoHS: Yes; Stock 1: 2153; Pricing 1: 1=0.68000, 10=0.57700, 50=0.57700, 100=0.40000, 1000=0.26200, 10000=0.21000 (USD); Mount: Surface Mount; Case/Package: SOT-23-5; Min Operating Temperature: -40°C; Max Operating Temperature: 125°C; Packaging: Tape and Reel; Output Type: Fixed; RoHS Compliant: Yes; ComponentLink1URL: https://www.exar.com/content/document.ashx?id=22106&src-supplier=Digi-Key; ComponentLink1Description: https://www.exar.com/content/document.ashx?id=22106&src-supplier=Digi-Key; Supplier Part Number 1: 701-SPX3819M5-L-30TR
footprint SOT-23-5
pins: 1 VIN, 2 GND, 3 EN, 4 ADJ/BYP, 5 VOUT

## SPX3819M5-L-3-3/TR
designator U?
SPX3819 Series 3.3 V 500 mA Fixed Output SMT LDO Regulator - SOT-23-5; Manufacturer: MaxLinear; Manufacturer Part Number: SPX3819M5-L-3-3/TR; Item Type: IC; Supplier 1: Newark; RoHS: Yes; Category: Voltage Regulators - Linear; RoHS Compliant: Yes; Supplier Part Number 1: 23R9703; LCSC Part Number: C9055; ComponentLink1Description: LCSC; ComponentLink1URL: https://www.lcsc.com/product-detail/Linear-Voltage-Regulators-LDO_MaxLinear-SPX3819M5-L-3-3-TR_C9055.html
footprint SOT-23-5
pins: 1 VIN, 2 GND, 3 EN, 4 ADJ/BYP, 5 VOUT

## SR0402FR-7T10KL
designator R?, comment 10K
RES 10K OHM 1% 1/5W 0402; Manufacturer: Yageo; Manufacturer Part Number: SR0402FR-7T10KL; Supplier 1: Digi-Key; Stock 1: 7859; Pricing 1: 1=0.56, 10=0.398, 100=0.2072, 1000=0.11156, 2500=0.10757, 5000=0.10598 (USD); RoHS Compliant: Yes; ComponentLink1URL: http://www.yageo.com/documents/recent/PYu-SR_D_F%20tol_RoHS_L_3.pdf?src-supplier=Digi-Key; ComponentLink1Description: http://www.yageo.com/documents/recent/PYu-SR_D_F%20tol_RoHS_L_3.pdf?src-supplier=Digi-Key; Supplier Part Number 1: YAG5815CT-ND; LCSC Part Number: C854480
footprint Res-0402
pins: 1, 2

## SR0402FR-7T100KL
designator R?, comment 100K
RES 100K OHM 1% 1/5W 0402; Manufacturer: Yageo; Manufacturer Part Number: SR0402FR-7T100KL; Supplier 1: Digi-Key; Stock 1: 11129; Pricing 1: 1=0.56, 10=0.398, 100=0.2072, 1000=0.11156, 2500=0.10757, 5000=0.10598 (USD); RoHS Compliant: Yes; ComponentLink1URL: http://www.yageo.com/documents/recent/PYu-SR_D_F%20tol_RoHS_L_3.pdf?src-supplier=Digi-Key; ComponentLink1Description: http://www.yageo.com/documents/recent/PYu-SR_D_F%20tol_RoHS_L_3.pdf?src-supplier=Digi-Key; Supplier Part Number 1: YAG5813CT-ND; LCSC Part Number: C854478
footprint Res-0402
pins: 1, 2

## SRN6045TA-3R3Y
designator L?, comment 3.3uH
FIXED IND 3.3UH 5A 21 MOHM SMD; Manufacturer: Bourns; Manufacturer Part Number: SRN6045TA-3R3Y; Saturation Current: 7.8A; DC Resistance (DCR): 21mR; Inductance Tolerance: 30%; Supplier 1: Digi-Key; Stock 1: 12225; Pricing 1: 1=0.59, 10=0.514, 25=0.4776, 50=0.4042, 100=0.3675, 250=0.34544, 500=0.3087 (USD); Mount: Surface Mount; Inductance: 3.3uH; RMS Current (Irms): 5A; Packaging: Cut Tape; REACH SVHC: No SVHC; RoHS Compliant: Yes; ComponentLink1URL: http://www.farnell.com/datasheets/2647414.pdf?src-supplier=Farnell; ComponentLink1Description: http://www.farnell.com/datasheets/2647414.pdf?src-supplier=Farnell; ComponentLink2URL: http://www.farnell.com/datasheets/2113223.pdf?src-supplier=Element14; ComponentLink2Description: http://www.farnell.com/datasheets/2113223.pdf?src-supplier=Element14; ComponentLink3URL: http://www.farnell.com/datasheets/2647414.pdf?src-supplier=Newark; ComponentLink3Description: http://www.farnell.com/datasheets/2647414.pdf?src-supplier=Newark; ComponentLink4URL: https://www.bourns.com/docs/Product-Datasheets/SRN6045TA.pdf?src-supplier=Digi-Key; ComponentLink4Description: https://www.bourns.com/docs/Product-Datasheets/SRN6045TA.pdf?src-supplier=Digi-Key; Supplier Part Number 1: SRN6045TA-3R3YCT-ND; LCSC Part Number: C3221229
footprint SRN6045TA-3R3Y_
pins: 1, 2

## SRX882-433MHZ
designator U?
RF Modules ROHS; Manufacturer: G-NiceRF; Manufacturer Part Number: SRX882-433MHZ; LCSC Part Number: C5126754; ComponentLink1Description: LCSC; ComponentLink1URL: https://www.lcsc.com/product-detail/RF-Modules_G-NiceRF-STX882S-433MHZ-SRX882-433MHZ-SW433-TH32_C5126754.html
footprint SRX882-433MHZ
pins: 1 ANT, 2 GND, 3 VCC, 4 CS, 5 DATA, 6 GND, 7 ANT

## SS11-BBIWJ-R30-R
designator SW?
Black Concave edge bending SPDT | O PCPin 16A 250V Plugin Rocker Switches ROHS; Manufacturer: Legion; Manufacturer Part Number: SS11-BBIWJ-R30-R; Item Type: Switch; Package: Plugin; LCSC Part Number: C309071; ComponentLink1Description: LCSC; ComponentLink1URL: https://www.lcsc.com/product-detail/Rocker-Switches_Legion-SS11-BBIWJ-R30-R_C309071.html
footprint SS11-BBIWJ-R30-R
pins: 1, 2, 3

## SS16
designator D?
60V 700mV@1A 1A SMA(DO-214AC) Schottky Barrier Diodes (SBD) ROHS; Manufacturer: MDD; Manufacturer Part Number: SS16; Item Type: Schottky Diode; Package: SMA(DO-214AC); LCSC Part Number: C2481; ComponentLink1Description: LCSC; ComponentLink1URL: https://www.lcsc.com/product-detail/Schottky-Barrier-Diodes-SBD_MDD-Microdiode-Electronics-SS16_C2481.html
footprint SMA
pins: 1 K, 2 A

## SS24A
designator D?
40V 500mV@2A 2A SMA(DO-214AC) Schottky Barrier Diodes (SBD) ROHS; Manufacturer: Guangdong Hottech; Manufacturer Part Number: SS24A; Package: SMA(DO-214AC); LCSC Part Number: C2886579; ComponentLink1Description: LCSC; ComponentLink1URL: https://www.lcsc.com/product-detail/Schottky-Barrier-Diodes-SBD_Guangdong-Hottech-SS24A_C2886579.html
footprint SMA
pins: 1 K, 2 A

## SS32
designator D?
DIODE SCHOTTKY 20V 3A SMC; Manufacturer: ON Semiconductor / Fairchild; Manufacturer Part Number: SS32; Number of Terminals/Pins: 2; Package Body Material: Plastic; Diode Element Material: SILICON; Element Configuration: Single; Forward Voltage: 500mV; Max Reverse Current: 500uA; Max Forward Surge Current (Ifsm): 100A; Polarity: Standard; Max Power Dissipation: 2.27W; Number of Elements: 1; JEDEC-95 Code: DO-214AB; Supplier 1: Digi-Key; RoHS: Yes; Category: Rectifier Diodes; Stock 1: 2866; Pricing 1: 1=0.83000, 10=0.73200, 100=0.56100, 500=0.44350, 1000=0.35480 (USD); Mount: Surface Mount; Case/Package: SMC; Number of Pins: 2; Weight: 0.3g; Package Shape: Rectangular; Terminal Finish: Tin; Min Operating Temperature: -55°C; Max Operating Temperature: 150°C; Packaging: Tape and Reel; Series: -; Package Quantity: 1; Voltage Rating (DC): 20V; Current Rating: 3A; Output Current: 3A; Forward Current: 3A; Max Repetitive Reverse Voltage (Vrrm): 20V; Max Surge Current: 100A; Max Reverse Leakage Current: 500uA; Peak Non-Repetitive Surge Current: 100A; Average Rectified Current: 3A; Max Reverse Voltage (DC): 20V; Moisture Sensitivity Level: 1; JESD-30 Code: R-PDSO-C2; Peak Reflow Temperature (Cel): 260°C; Surface Mount: Yes; Terminal Position: DUAL; Technology: SCHOTTKY; Number of Phases: 1; Terminal Form: C BEND; Length: 7.15mm; Width: 6.25mm; Height: 2.75mm; Radiation Hardening: No; RoHS Compliant: Yes; Lead Free: Lead Free; Reach SVHC Compliant: Yes; Supplier Part Number 1: SS32CT-ND; LCSC Part Number: *; Item Type: *; ComponentLink1Description: New link; ComponentLink1URL: *
footprint SMC
pins: 1 K, 2 A

## SS32 /SMA(DO-214AC)
designator D?
20V 500mV@3A 3A SMA(DO-214AC) Schottky Barrier Diodes (SBD) ROHS; Manufacturer: MDD; Manufacturer Part Number: SS32; Item Type: Diode; Package: SMA(DO-214AC); LCSC Part Number: C34897; ComponentLink1Description: LCSC; ComponentLink1URL: https://www.lcsc.com/product-detail/Schottky-Barrier-Diodes-SBD_MDD-Microdiode-Electronics-SS32_C34897.html
footprint SMA
pins: 1 K, 2 A

## SS34
designator D?
0.5mA@40V 40V Single 3A 0.55V@3A SMA(DO-214AC) Schottky Barrier Diodes (SBD) ROHS; Manufacturer: MDD; Manufacturer Part Number: SS34; Item Type: Diode; Package: SMA(DO-214AC); LCSC Part Number: C8678; ComponentLink1Description: LCSC; ComponentLink1URL: https://www.lcsc.com/product-detail/Schottky-Barrier-Diodes-SBD_MDD-Microdiode-Electronics-SS34_C8678.html
footprint SMA
pins: 1 K, 2 A

## SS36
designator D?
Schottky Barrier Diode SK36, DO-214AB, 3A/60V; Manufacturer: ON Semiconductor / Fairchild; Manufacturer Part Number: SS36; Output Current: 3A; Element Configuration: Single; Forward Voltage: 750mV; Max Repetitive Reverse Voltage (Vrrm): 60V; Max Forward Surge Current (Ifsm): 100A; Max Reverse Current: 500uA; Polarity: Standard; Power Dissipation: 2.27W; Supplier 1: Rs; RoHS: Yes; Category: Schottky Diodes; Stock 1: 100; Pricing 1: 100=0.43800, 500=0.34200, 1000=0.27800, 3000=0.25000 (GBP); Mount: Surface Mount; Case/Package: SMC; Number of Pins: 2; Min Operating Temperature: -55°C; Max Operating Temperature: 150°C; Packaging: Tape and Reel; Package Quantity: 3000; Series: -; Forward Current: 3A; Peak Non-Repetitive Surge Current: 100A; Voltage Rating (DC): 60V; Current Rating: 3A; Max Surge Current: 100A; Average Rectified Current: 3A; Max Reverse Leakage Current: 500uA; Max Reverse Voltage (DC): 60V; Current: 3A; Voltage: 60V; Radiation Hardening: No; RoHS Compliant: Yes; Reach SVHC Compliant: Yes; Lead Free: Lead Free; ComponentLink1URL: https://datasheet.ciiva.com/4714/ss36-197193-4714610.pdf?src-supplier=Mouser; ComponentLink1Description: https://datasheet.ciiva.com/4714/ss36-197193-4714610.pdf?src-supplier=Mouser; ComponentLink2URL: https://datasheet.ciiva.com/16889/ss36-16889545.pdf?src-supplier=Future+Electronics; ComponentLink2Description: https://datasheet.ciiva.com/16889/ss36-16889545.pdf?src-supplier=Future+Electronics; ComponentLink3URL: https://datasheet.ciiva.com/920/ss34-920433.pdf?src-supplier=Digi-Key; ComponentLink3Description: https://datasheet.ciiva.com/920/ss34-920433.pdf?src-supplier=Digi-Key; ComponentLink4URL: https://datasheet.ciiva.com/920/ss34-920434.pdf?src-supplier=Digi-Key; ComponentLink4Description: https://datasheet.ciiva.com/920/ss34-920434.pdf?src-supplier=Digi-Key; ComponentLink5URL: https://datasheet.ciiva.com/920/ss34-920435.pdf?src-supplier=Digi-Key; ComponentLink5Description: https://datasheet.ciiva.com/920/ss34-920435.pdf?src-supplier=Digi-Key; Supplier Part Number 1: 9034425P; LCSC Part Number: C16015; Item Type: Diode
footprint SMA
pins: 1 K, 2 A

## SS54B-HF
designator D?
DIODE SCHOTTKY 5A 40V SMB; Manufacturer: Comchip; Manufacturer Part Number: SS54B-HF; Supplier 1: Mouser; RoHS: No; Stock 1: 2862; Pricing 1: 1=0.56000, 10=0.32900, 50=0.32900, 100=0.17100, 1000=0.11900, 10000=0.09000 (USD); Supplier Part Number 1: 750-SS54B-HF; LCSC Part Number: C3759253
footprint SMB_
pins: 1 A, 2 K

## SS56
designator D?
DIODE SCHOTTKY 60V 5A SMA; Manufacturer Part Number: SS56; Manufacturer: MDD; LCSC Par Number: C65009; Iterm Type: Diode; ComponentLink1Description: LCSC; ComponentLink1URL: https://www.lcsc.com/product-detail/Schottky-Barrier-Diodes-SBD_MDD-Microdiode-Electronics-SS56_C65009.html
footprint SMA
pins: 1 K, 2 A

## SS510B
designator D?
SCHOTTKY DIODE SMB 100V 5A; Manufacturer: MDD; Manufacturer Part Number: SS510B; Package: SMB; ComponentLink1Description: LCSC; ComponentLink1URL: https://www.lcsc.com/product-detail/Schottky-Barrier-Diodes-SBD_JUXING-SS510B_C3011128.html; LCSC Part Number: C3011128; Item Type: Diode
footprint SMB_
pins: 1 A, 2 K

## SS-12D02-G040
designator SW?
Straight 1A SPDT 8.7mm 8.6mm 24V 4.5mm Black PCPin 10000 Rectangular columnar -25℃~+70℃ Plugin Slide Switches ROHS; Manufacturer: G-Switch; Manufacturer Part Number: SS-12D02-G040; Item Type: Switch; Package: Custom; LCSC Part Number: C2876023; ComponentLink1Description: LCSC; ComponentLink1URL: https://www.lcsc.com/product-detail/Slide-Switches_G-Switch-SS-12D02-G040_C2876023.html
footprint SS-12D02-G040
pins: 1, 2, 3

## SS-12D11G5R
designator SW?
Shrouded 5A SPDT 125V 6.3mm 13.5mm 125V 6.6mm 5A PCPin 10000 Rectangular columnar -40℃~+85℃ Black Plugin Slide Switches ROHS; Manufacturer Part Number: SS-12D11G5R; Manufacturer: XKB Connectivity; Package: Custom; LCSC Part Number: C388633; ComponentLink1Description: LCSC; ComponentLink1URL: https://www.lcsc.com/product-detail/Slide-Switches_XKB-Connectivity-SS-12D11G5R_C388633.html
footprint SS-12D11G5R_
pins: 1, 2, 3, MH1, MH2

## SS-12D11L5
designator SW?
Lying 3A SPDT 125V 6.3mm 13.5mm 125V 6.6mm 3A PCPin 10000 Rectangular columnar -40℃~+85℃ Black Plugin Slide Switches ROHS; Manufacturer: XKB Connectivity; Manufacturer Part Number: SS-12D11L5; Item Type: Switch; Package: Plugin; LCSC Part Number: C319010; ComponentLink1Description: LCSC Part Number; ComponentLink1URL: https://www.lcsc.com/product-detail/Slide-Switches_XKB-Connectivity-SS-12D11L5_C319010.html
footprint SS-12D11L5
pins: 1, 2, 3, 4 MH1, 5 MH2

## SS-3235D-03-L2
designator SW?
SPDT 50mA @ 12VDC 12V On-On SMD Toggle Switches RoHS; Manufacturer: XKB Connectivity; Manufacturer Part Number: SS-3235D-03-L2; Actuator Orientation: Vertical; Switch Height: 3mm; Actuator Type: Standard; Electrical Life Cycles: 10000; Operating Force: 200±100gf; Package: SMD; Circuit: SPDT; Contact Rating @ Voltage: 50mA @ 12VDC; Rated Voltage(DC): 12V; Mounting Type: Surface Mount; Contact Material: Brass; Contact Finish: Silver; LCSC Part Number: C381097; ComponentLink1Description: LCSC; ComponentLink1URL: https://www.lcsc.com/product-detail/Slide-Switches_XKB-Connectivity-SS-3235D-03-L2_C381097.html
footprint SS-3235D-03-L2_
pins: 1 +, 2 +, 3 +

## SSL110A
designator D?
500μA@100V 100V Single 600mV@1A 1A SMA Schottky Barrier Diodes (SBD) ROHS; Manufacturer: Yangzhou; Manufacturer Part Number: SSL110A; Package: SMA; ComponentLink1Description: LCSC; ComponentLink1URL: https://www.lcsc.com/product-detail/Schottky-Barrier-Diodes-SBD_Yangzhou-Yangjie-Elec-Tech-SSL110A_C698870.html; LCSC Part Number: C698870
footprint SMA
pins: 1 K, 2 A

## SSL0804T-150M-N
designator L?, comment 15uH
3A 15uH ±20% 0.046Ω 3A SMD Power Inductors ROHS; Manufacturer: Chilisin Elec; Manufacturer Part Number: SSL0804T-150M-N; Package: SMD; LCSC Part Number: C329870; Item Type: Inductor; ComponentLink1Description: LCSC; ComponentLink1URL: https://www.lcsc.com/product-detail/Power-Inductors_Chilisin-Elec-SSL0804T-150M-N_C329870.html
footprint SSL0804T-150M-N.
pins: 1, 2

## SSL0804T-220M-N
designator L?, comment 22uH
2.6A 22uH ±20% 0.085Ω 2.6A SMD,12.95x9.4x5.21mm Power Inductors ROHS; Manufacturer: Chilisin Elec; Manufacturer Part Number: SSL0804T-220M-N; Package: SMD,12.95x9.4x5.21mm; LCSC Part Number: C108312; Item Type: Inductor; ComponentLink1Description: LCSC; ComponentLink1URL: https://www.lcsc.com/product-detail/Power-Inductors_Chilisin-Elec-SSL0804T-220M-N_C108312.html
footprint SSL0804T-220M-N
pins: 1, 2

## ST20100L
designator D?
100V Single 650mV@20A 20A TO-277 Schottky Barrier Diodes (SBD) ROHS; Manufacturer: Jiangsu Changjing Electronics Technology Co., Ltd.; Manufacturer Part Number: ST20100L; Item Type: Diode; Package: TO-277; LCSC Part Number: C2693410; ComponentLink1Description: LCSC; ComponentLink1URL: https://www.lcsc.com/product-detail/Schottky-Barrier-Diodes-SBD_Jiangsu-Changjing-Electronics-Technology-Co-Ltd-ST20100L_C2693410.html
footprint TO-277
pins: 1 A1, 2 K, 3 A2

## ST-1112RA-P
designator SW?
-20℃~+85℃ SMDSplicing Black Rectangle button 50mA Surface Mount SPST 100MΩ 100000 250gf@±50gf 12V SMD Tactile Switches ROHS; Manufacturer: RI SHENG; Manufacturer Part Number: ST-1112RA-P; Item Type: Switch; Footprint: Custom; ComponentLink1Description: LCSC; ComponentLink1URL: https://www.lcsc.com/product-detail/Tactile-Switches_RI-SHENG-ST-1112RA-P_C589180.html; LCSC Part Number: C589180
footprint ST-1112RA-P_
pins: 1, 2

## STM32F070CBT6TR
designator U?
IC MCU 32BIT 128KB FLASH 48LQFP; Manufacturer: STMicroelectronics; Manufacturer Part Number: STM32F070CBT6TR; Frequency: 48MHz; Interface: I2C,SPI,USB,UART,USART; Number of I/Os: 37; Oscillator Type: Internal; Peripherals: POR,PWM,WDT,DMA; Core Architecture: ARM; Supplier 1: Digi-Key; RoHS: Yes; Category: Microcontrollers; Pricing 1: 1=3.40000, 10=3.05100, 25=2.87800, 100=2.45200, 250=2.30232, 500=2.01452, 1000=1.91860 (USD); Case/Package: LQFP; Min Operating Temperature: -40°C; Max Operating Temperature: 85°C; Packaging: Tape and Reel; Memory Type: FLASH; Memory Size: 128KB; Lead Free: Lead Free; RoHS Compliant: Yes; ComponentLink1URL: http://www.mouser.com/ds/2/389/stm32f070c6-956182.pdf?src-supplier=Mouser; ComponentLink1Description: http://www.mouser.com/ds/2/389/stm32f070c6-956182.pdf?src-supplier=Mouser; ComponentLink2URL: http://www.st.com/content/ccc/resource/technical/document/datasheet/31/4f/10/5f/a5/32/46/42/DM00141386.pdf/files/DM00141386.pdf/jcr:content/translations/en.DM00141386.pdf?src-supplier=Digi-Key; ComponentLink2Description: http://www.st.com/content/ccc/resource/technical/document/datasheet/31/4f/10/5f/a5/32/46/42/DM00141386.pdf/files/DM00141386.pdf/jcr:content/translations/en.DM00141386.pdf?src-supplier=Digi-Key; Supplier Part Number 1: 497-18745-6-ND; LCSC Part Number: C2053863; Item Type: IC
footprint 48-LQFP (7x7)_
part A pins: 1 VDD, 2 PC13, 3 PC14-OSC32_IN, 4 PC15-OSC32_OUT, 5 PF0-OSC_IN, 6 PF1-OSC_OUT, 7 NRST, 8 VSSA, 9 VDDA, 23 VSS, 24 VDD, 35 VSS, 36 VDD, 44 BOOT0, 47 VSS, 48 VDD
part B pins: 10 PA0, 11 PA1, 12 PA2, 13 PA3, 14 PA4, 15 PA5, 16 PA6, 17 PA7, 18 PB0, 19 PB1, 20 PB2, 21 PB10, 22 PB11, 25 PB12, 26 PB13, 27 PB14, 28 PB15, 29 PA8, 30 PA9, 31 PA10, 32 PA11, 33 PA12, 34 PA13, 37 PA14, 38 PA15, 39 PB3, 40 PB4, 41 PB5, 42 PB6, 43 PB7, 45 PB8, 46 PB9

## STM32F072VBT6
designator U?
IC MCU 32BIT 128KB FLASH 100LQFP; Manufacturer: STMicroelectronics; Manufacturer Part Number: STM32F072VBT6; Package: LQFP-100(14x14); LCSC Part Number: C713240; Item Type: IC; ComponentLink1URL: https://www.lcsc.com/product-detail/Microcontroller-Units-MCUs-MPUs-SOCs_STMicroelectronics-STM32F072VBT6_C713240.html; ComponentLink1Description: LCSC
footprint LQFP-100
part A pins: 6 VBAT, 8 PC14-OSC32_IN, 9 PC15-OSC32_OUT, 12 PF0-OSC_IN, 13 PF1-OSC_OUT, 14 NRST, 20 VSSA, 21 VDDA, 27 VSS, 28 VDD, 49 VSS, 50 VDD, 74 VSS, 75 VDDIO2, 94 BOOT0, 99 VSS, 100 VDD
part B pins: 23 PA0, 24 PA1, 25 PA2, 26 PA3, 29 PA4, 30 PA5, 31 PA6, 32 PA7, 35 PB0, 36 PB1, 37 PB2, 47 PB10, 48 PB11, 51 PB12, 52 PB13, 53 PB14, 54 PB15, 67 PA8, 68 PA9, 69 PA10, 70 PA11, 71 PA12, 72 PA13, 76 PA14, 77 PA15, 89 PB3, 90 PB4, 91 PB5, 92 PB6, 93 PB7, 95 PB8, 96 PB9
part C pins: 7 PC13, 15 PC0, 16 PC1, 17 PC2, 18 PC3, 33 PC4, 34 PC5, 55 PD8, 56 PD9, 57 PD10, 58 PD11, 59 PD12, 60 PD13, 61 PD14, 62 PD15, 63 PC6, 64 PC7, 65 PC8, 66 PC9, 78 PC10, 79 PC11, 80 PC12, 81 PD0, 82 PD1, 83 PD2, 84 PD3, 85 PD4, 86 PD5, 87 PD6, 88 PD7
part D pins: 1 PE2, 2 PE3, 3 PE4, 4 PE5, 5 PE6, 10 PF9, 11 PF10, 19 PF2, 22 PF3, 38 PE7, 39 PE8, 40 PE9, 41 PE10, 42 PE11, 43 PE12, 44 PE13, 45 PE14, 46 PE15, 73 PF6, 97 PE0, 98 PE1

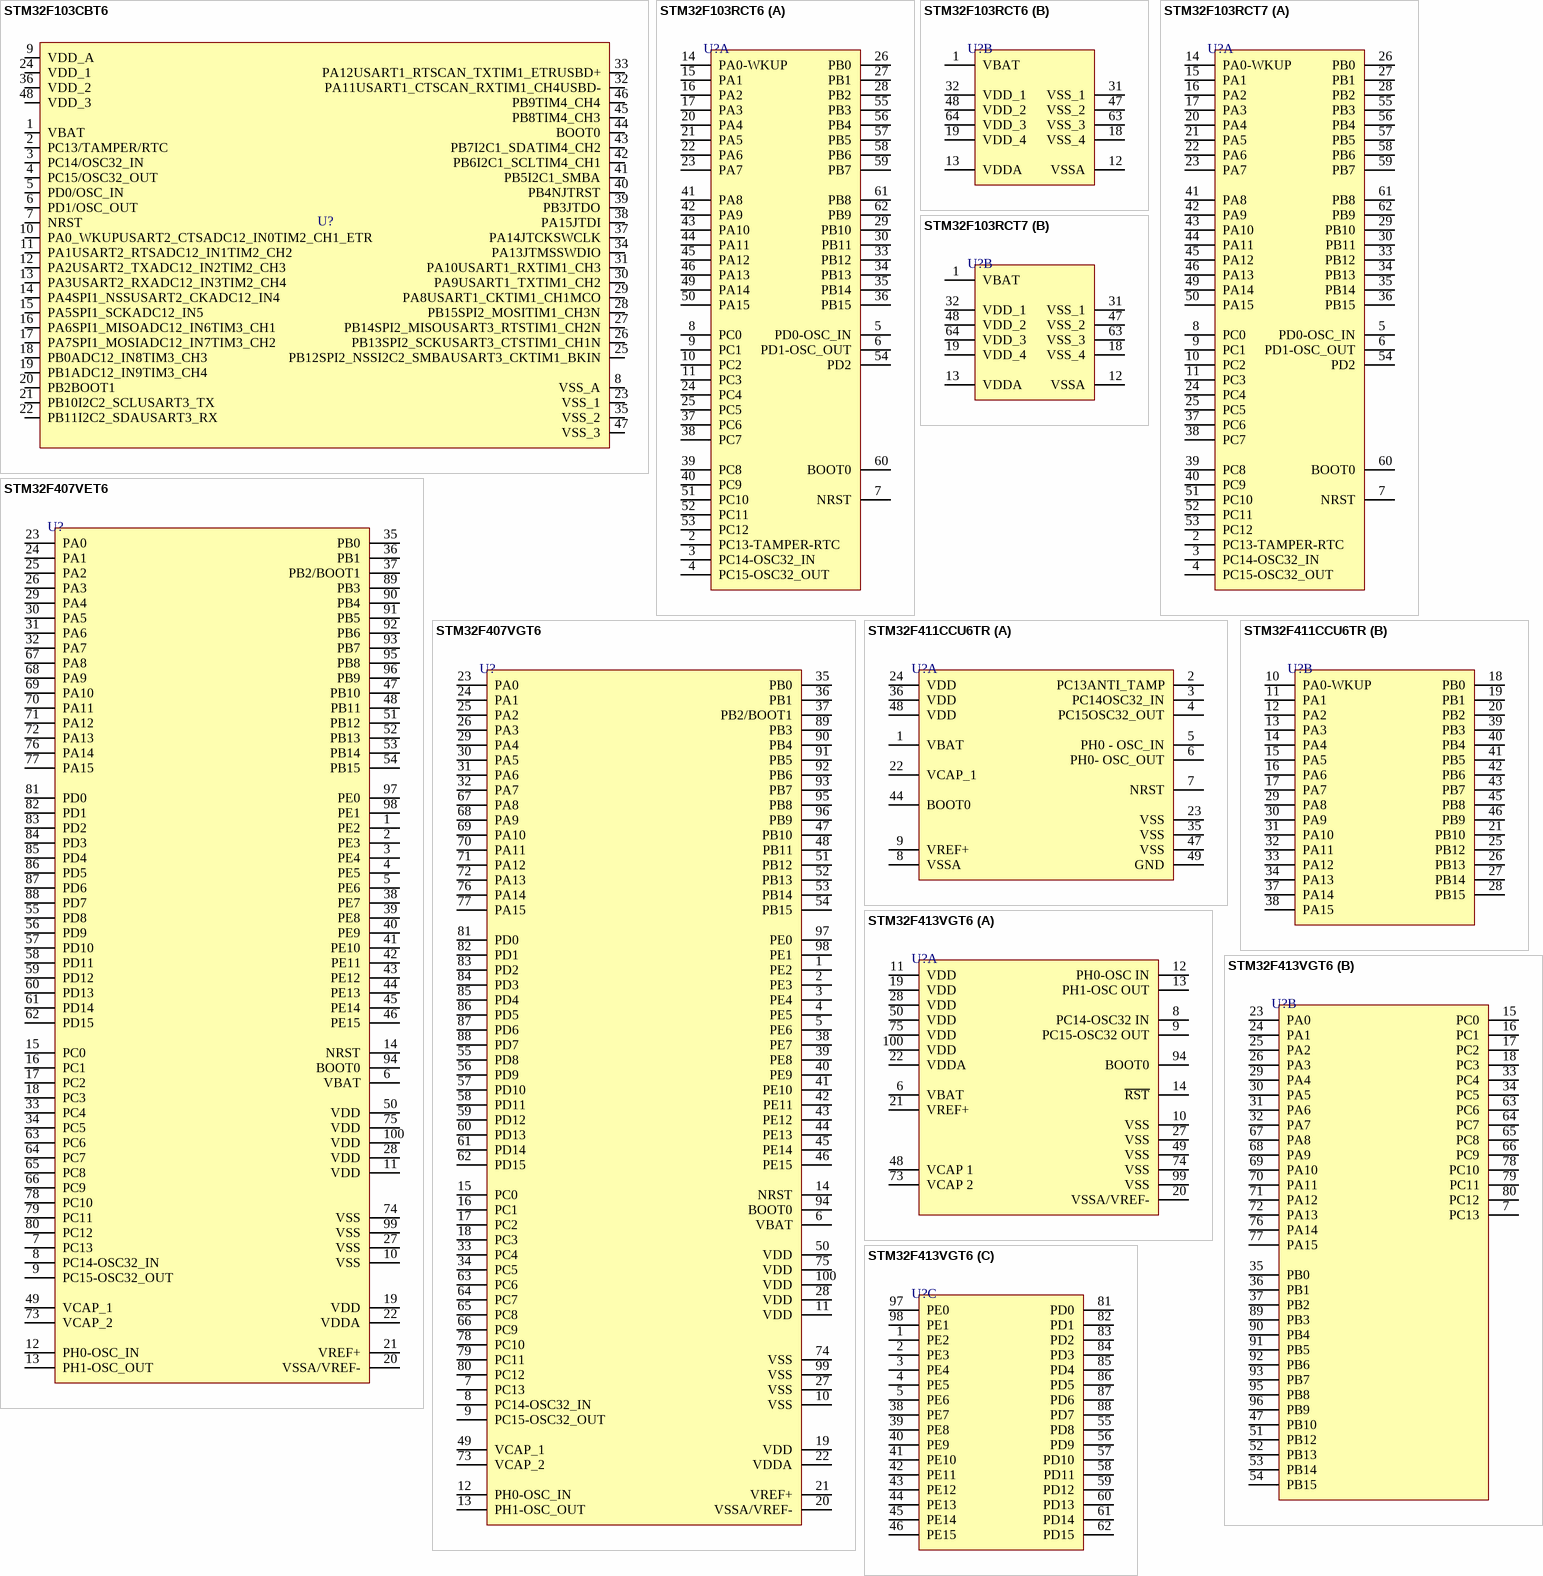
[diagram p39: symbols STM32F103CBT6 to STM32F413VGT6]